# Altium schematic symbol library Optoelectronics.SchLib: 1 symbol
Pins are listed as number, name and electrical type; pins without a type are passive.

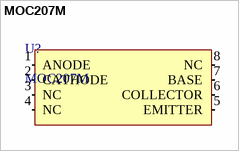
[diagram p0: symbol MOC207M]

## MOC207M
designator U?
8-pin SOIC Single-Channel Phototransistor Output Optocoupler; Manufacturer: ONSEMI/Fairchild; Isolation voltage: 2,5kV; CTR: 100-200%; Vce: 30V; ton: 3,2us; toff: 4,7us
footprint SOIC127P590X363-8N (SOIC, 8-Leads, Body 4,88x3,91mm, Pitch 1,27mm, IPC Medium Density)
pins: 1 ANODE, 2 CATHODE, 3 NC, 4 NC, 5 EMITTER, 6 COLLECTOR, 7 BASE, 8 NC